# Altium footprint library Header_Pcb.PcbLib: 49 footprints (part 1 of 4)
Each footprint in its own frame and in the unit in brackets; x right, y up, seen from the top. Pads: shape width x height; smd on the part's side, far side on the other; paste and mask are expansions set on the pad; w line width, h text height; cw(c..) or ccw(c..) is an arc to the next point about the centre after c.
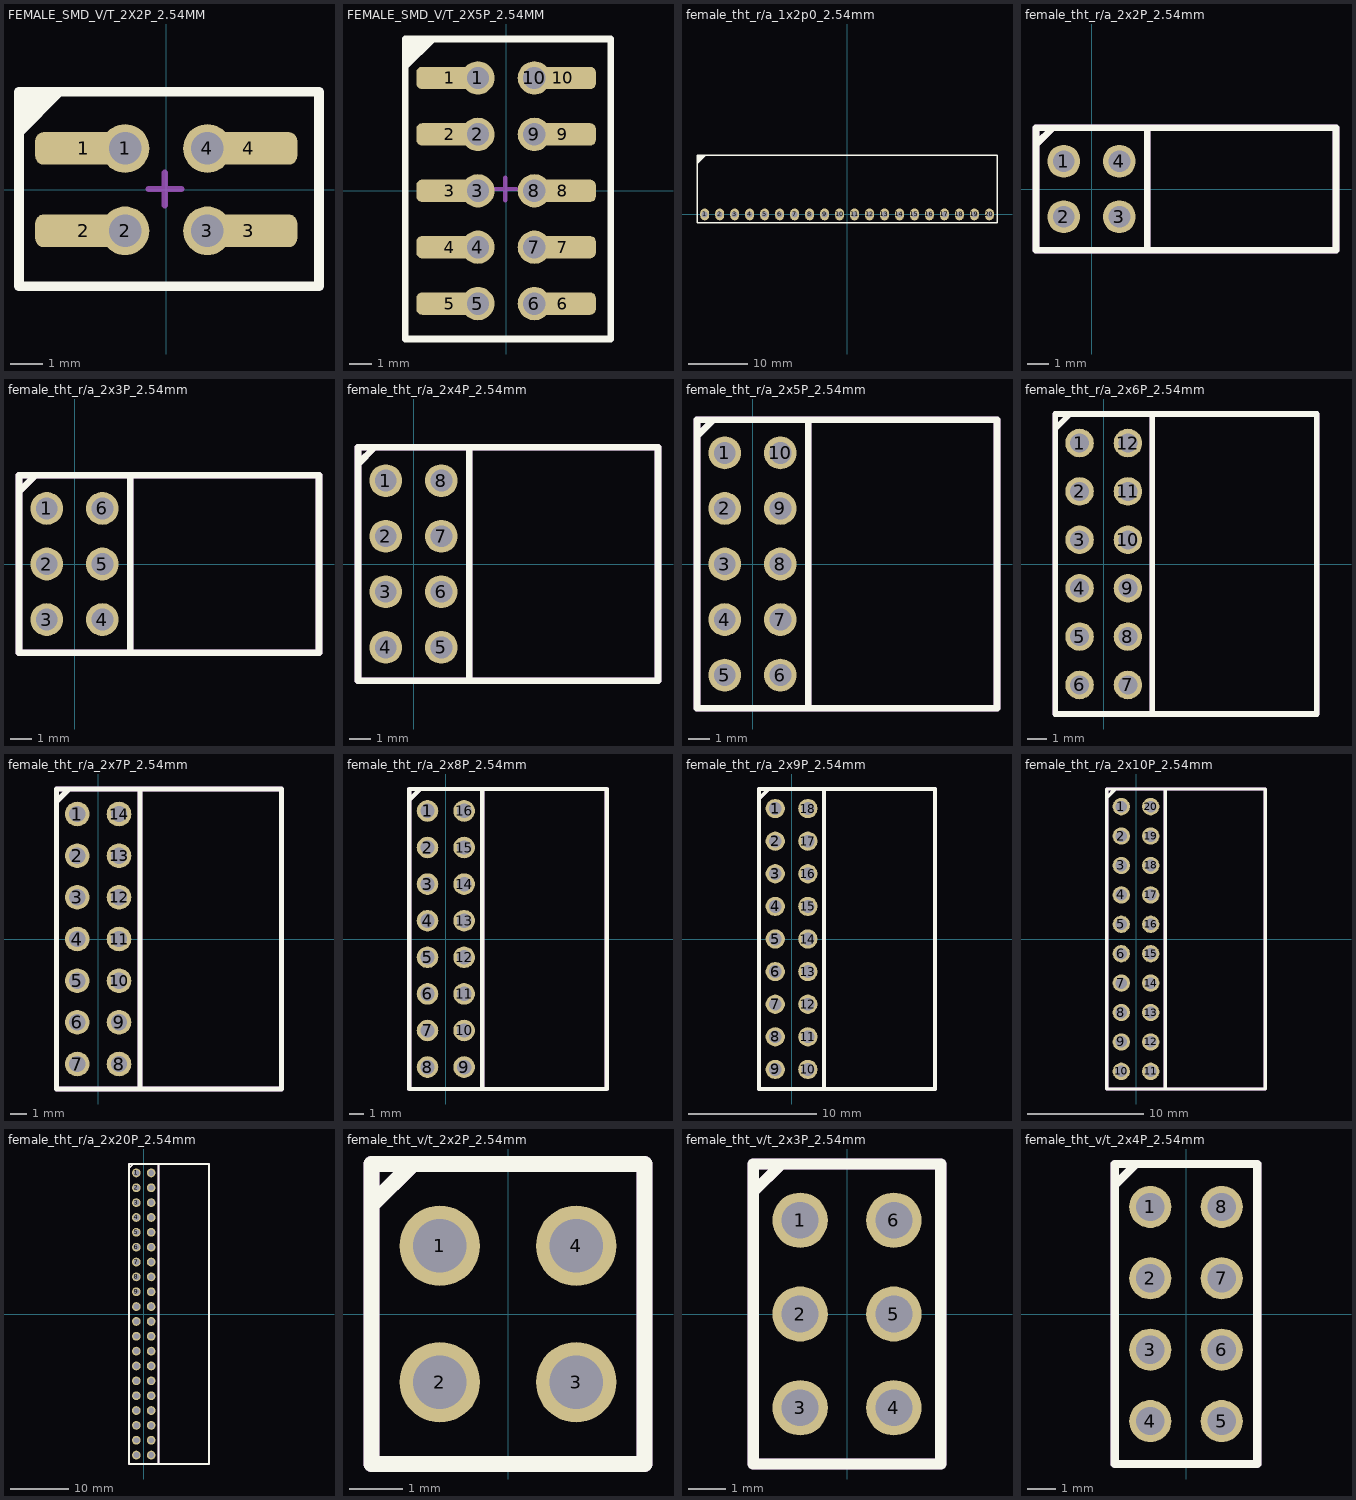
[diagram p0: the footprints below, top view; thin cyan lines are the x and y axes]

## FEMALE_SMD_V/T_2X2P_2.54MM [mm]
pads (8):
  rrect50% 3x1 smd: 1(-2.54,1.27) 2(-2.54,-1.27) 3(2.54,-1.27) 4(2.54,1.27)
  round 1.5 hole 1: 1(-1.27,1.27) 2(-1.27,-1.27) 3(1.27,-1.27) 4(1.27,1.27)
Top Overlay:
  lines w0.3: -4.54,1.77 -3.29,3.02 ; -4.54,2.02 -3.54,3.02 ; -4.54,2.27 -3.79,3.02 ; -4.54,2.52 -4.04,3.02 ; -4.04,2.77 -3.79,3.02 ; -4.04,2.77 -4.04,2.77 ; -3.79,3.02 -3.79,3.02 ; -3.54,3.02 -3.79,2.77 -3.54,3.02 ; -4.54,-2.98 4.71,-2.98 4.71,3.02 -4.54,3.02 -4.54,-2.98
Mechanical 13:
  lines w0.2: -4.54,1.77 -3.29,3.02 ; -4.54,-2.98 4.71,-2.98 4.71,3.02 -4.54,3.02 -4.54,-2.98
Mechanical 15:
  lines w0.2: -0.54,0.02 0.46,0.02 ; -0.04,-0.48 -0.04,0.52 ; -4.54,-2.98 4.71,-2.98 4.71,3.02 -4.54,3.02 -4.54,-2.98
3D body "female_vt_2x2p_smd_2.54mm.stp": height 7.46, standoff 0.01, extent -3.39,-2.77 3.31,2.81

## FEMALE_SMD_V/T_2X5P_2.54MM [mm]
pads (20):
  rrect50% 3x1 smd: 1(-2.54,5.08) 2(-2.54,2.54) 3(-2.54,0) 4(-2.54,-2.54) 5(-2.54,-5.08) 6(2.54,-5.08) 7(2.54,-2.54) 8(2.54,0) 9(2.54,2.54) 10(2.54,5.08)
  round 1.5 hole 1: 1(-1.27,5.08) 2(-1.27,2.54) 3(-1.27,0) 4(-1.27,-2.54) 5(-1.27,-5.08) 6(1.27,-5.08) 7(1.27,-2.54) 8(1.27,0) 9(1.27,2.54) 10(1.27,5.08)
Top Overlay:
  lines w0.3: -4.54,5.58 -3.29,6.83 ; -4.54,5.83 -3.54,6.83 ; -4.54,6.08 -3.79,6.83 ; -4.54,6.33 -4.04,6.83 ; -4.04,6.58 -4.04,6.58 ; -4.04,6.58 -3.79,6.83 ; -3.79,6.83 -3.79,6.83 ; -3.54,6.83 -3.79,6.58 -3.54,6.83 ; -4.54,-6.67 -4.54,6.83 4.71,6.83 4.71,-6.67 -4.54,-6.67
Mechanical 13:
  lines w0.2: -4.54,5.58 -3.29,6.83 ; -4.54,-6.67 -4.54,6.83 4.71,6.83 4.71,-6.67 -4.54,-6.67
  text ".Designator" at -2.54,0.065 h1.25
Mechanical 15:
  lines w0.2: -0.54,0.08 0.46,0.08 ; -0.04,-0.42 -0.04,0.58 ; -4.54,-6.67 -4.54,6.83 4.71,6.83 4.71,-6.67 -4.54,-6.67
3D body "female_vt_2x10p_smd_2.54mm.stp": height 8.91, standoff 0.01, extent -4.165,-6.595 4.335,6.605

## female_tht_r/a_1x2p0_2.54mm [mm]
pads (20):
  oval 1.5x2 hole 1: 1(-24.13,0) 2(-21.59,0) 3(-19.05,0) 4(-16.51,0) 5(-13.97,0) 6(-11.43,0) 7(-8.89,0) 8(-6.35,0) 9(-3.81,0) 10(-1.27,0) 11(1.27,0) 12(3.81,0) 13(6.35,0) 14(8.89,0) 15(11.43,0) 16(13.97,0) 17(16.51,0) 18(19.05,0) 19(21.59,0) 20(24.13,0)
Top Overlay:
  region: -25.355,9.925 -23.905,9.925 -25.355,8.475
  lines w0.25: -25.43,-1.375 -25.43,10 25.42,10 25.42,-1.375 -25.43,-1.375
3D body "single female 20P 2.54pitch right angle.stp": height 2.55, standoff -3.19, extent -25.43,-0.3 25.37,8.3

## female_tht_r/a_2x2P_2.54mm [mm]
pads (4):
  round 1.5 hole 1: 1(-1.27,1.27) 2(-1.27,-1.27) 3(1.27,-1.27) 4(1.27,1.27)
Top Overlay:
  lines w0.3: -2.54,2.032 -1.778,2.794 ; 2.54,-2.794 2.54,2.794 ; -2.54,-2.794 -2.54,2.794 11.176,2.794 11.176,-2.794 -2.54,-2.794
Mechanical 13:
  lines w0.3: -2.54,2.032 -1.778,2.794 ; 2.54,-2.794 2.54,2.794 ; -2.54,-2.794 -2.54,2.794 11.176,2.794 11.176,-2.794 -2.54,-2.794
  text ".designator" at 2.687,-0.824 h1.5
3D body "female ra 2X2P 2.45mm.stp": height 5.01, standoff -3.19, extent -1.56,-2.665 11.04,2.665

## female_tht_r/a_2x3P_2.54mm [mm]
pads (6):
  round 1.5 hole 1: 1(-1.27,2.54) 2(-1.27,0) 3(-1.27,-2.54) 4(1.27,-2.54) 5(1.27,0) 6(1.27,2.54)
Top Overlay:
  lines w0.3: -2.54,3.302 -1.778,4.064 ; 2.54,-4.064 2.54,2.54 2.54,4.064 ; 2.54,-4.064 -2.54,-4.064 -2.54,2.54 -2.54,4.064 2.54,4.064 ; 2.54,-4.064 11.176,-4.064 11.176,4.064 2.54,4.064
Mechanical 13:
  lines w0.3: -2.54,3.302 -1.778,4.064 ; 2.54,-4.064 2.54,2.54 2.54,4.064 ; 2.54,-4.064 -2.54,-4.064 -2.54,2.54 -2.54,4.064 2.54,4.064 ; 2.54,-4.064 11.176,-4.064 11.176,4.064 2.54,4.064
  text ".designator" at 2.941,-0.824 h1.5
3D body "female ra 2X3P 2.45mm.stp": height 5.01, standoff -3.19, extent -1.56,-3.935 11.04,3.935

## female_tht_r/a_2x4P_2.54mm [mm]
pads (8):
  round 1.5 hole 1: 1(-1.27,3.81) 2(-1.27,1.27) 3(-1.27,-1.27) 4(-1.27,-3.81) 5(1.27,-3.81) 6(1.27,-1.27) 7(1.27,1.27) 8(1.27,3.81)
Top Overlay:
  lines w0.3: -2.54,4.572 -1.778,5.334 ; 2.54,-5.334 2.54,3.81 2.54,5.334 ; 2.54,-5.334 -2.54,-5.334 -2.54,3.81 -2.54,5.334 2.54,5.334 ; 2.54,-5.334 11.176,-5.334 11.176,5.334 2.54,5.334
Mechanical 13:
  lines w0.3: -2.54,4.572 -1.778,5.334 ; 2.54,-5.334 2.54,3.81 2.54,5.334 ; 2.54,-5.334 -2.54,-5.334 -2.54,3.81 -2.54,5.334 2.54,5.334 ; 2.54,-5.334 11.176,-5.334 11.176,5.334 2.54,5.334
  text ".designator" at 2.941,-0.824 h1.5
3D body "female ra 2X4P 2.45mm.stp": height 5.01, standoff -3.19, extent -1.56,-5.205 11.04,5.205

## female_tht_r/a_2x5P_2.54mm [mm]
pads (10):
  round 1.5 hole 1: 1(-1.27,5.08) 2(-1.27,2.54) 3(-1.27,0) 4(-1.27,-2.54) 5(-1.27,-5.08) 6(1.27,-5.08) 7(1.27,-2.54) 8(1.27,0) 9(1.27,2.54) 10(1.27,5.08)
Top Overlay:
  lines w0.3: -2.54,5.842 -1.778,6.604 ; 2.54,-6.604 2.54,5.08 2.54,6.604 ; 2.54,-6.604 -2.54,-6.604 -2.54,5.08 -2.54,6.604 2.54,6.604 ; 2.54,-6.604 11.176,-6.604 11.176,6.604 2.54,6.604
Mechanical 13:
  lines w0.3: -2.54,5.842 -1.778,6.604 ; 2.54,-6.604 2.54,5.08 2.54,6.604 ; 2.54,-6.604 -2.54,-6.604 -2.54,5.08 -2.54,6.604 2.54,6.604 ; 2.54,-6.604 11.176,-6.604 11.176,6.604 2.54,6.604
  text ".designator" at 2.941,-0.824 h1.5
3D body "female ra 2X5P 2.45mm.stp": height 5.01, standoff -3.19, extent -1.56,-6.475 11.04,6.475

## female_tht_r/a_2x6P_2.54mm [mm]
pads (12):
  round 1.5 hole 1: 1(-1.27,6.35) 2(-1.27,3.81) 3(-1.27,1.27) 4(-1.27,-1.27) 5(-1.27,-3.81) 6(-1.27,-6.35) 7(1.27,-6.35) 8(1.27,-3.81) 9(1.27,-1.27) 10(1.27,1.27) 11(1.27,3.81) 12(1.27,6.35)
Top Overlay:
  lines w0.3: -2.54,7.112 -1.778,7.874 ; 2.54,-7.874 11.176,-7.874 11.176,7.874 2.54,7.874 ; 2.54,-7.874 2.54,6.35 2.54,7.874 ; 2.54,-7.874 -2.54,-7.874 -2.54,6.35 -2.54,7.874 2.54,7.874
Mechanical 13:
  lines w0.3: -2.54,7.112 -1.778,7.874 ; 2.54,-7.874 11.176,-7.874 11.176,7.874 2.54,7.874 ; 2.54,-7.874 2.54,6.35 2.54,7.874 ; 2.54,-7.874 -2.54,-7.874 -2.54,6.35 -2.54,7.874 2.54,7.874
  text ".designator" at 2.941,-0.824 h1.5
3D body "female ra 2X6P 2.45mm.stp": height 5.01, standoff -3.19, extent -1.56,-7.745 11.04,7.745

## female_tht_r/a_2x7P_2.54mm [mm]
pads (14):
  round 1.5 hole 1: 1(-1.27,7.62) 2(-1.27,5.08) 3(-1.27,2.54) 4(-1.27,0) 5(-1.27,-2.54) 6(-1.27,-5.08) 7(-1.27,-7.62) 8(1.27,-7.62) 9(1.27,-5.08) 10(1.27,-2.54) 11(1.27,0) 12(1.27,2.54) 13(1.27,5.08) 14(1.27,7.62)
Top Overlay:
  lines w0.3: -2.54,8.382 -1.778,9.144 ; 2.54,-9.144 -2.54,-9.144 -2.54,7.62 -2.54,9.144 2.54,9.144 ; 2.54,-9.144 2.54,7.62 2.54,9.144 ; 2.54,-9.144 11.176,-9.144 11.176,9.144 2.54,9.144
Mechanical 13:
  lines w0.3: -2.54,8.382 -1.778,9.144 ; 2.54,-9.144 -2.54,-9.144 -2.54,7.62 -2.54,9.144 2.54,9.144 ; 2.54,-9.144 2.54,7.62 2.54,9.144 ; 2.54,-9.144 11.176,-9.144 11.176,9.144 2.54,9.144
  text ".designator" at 2.941,-0.824 h1.5
3D body "female ra 2X7P 2.45mm.stp": height 5.01, standoff -3.19, extent -1.56,-9.015 11.04,9.015

## female_tht_r/a_2x8P_2.54mm [mm]
pads (16):
  round 1.5 hole 1: 1(-1.27,8.89) 2(-1.27,6.35) 3(-1.27,3.81) 4(-1.27,1.27) 5(-1.27,-1.27) 6(-1.27,-3.81) 7(-1.27,-6.35) 8(-1.27,-8.89) 9(1.27,-8.89) 10(1.27,-6.35) 11(1.27,-3.81) 12(1.27,-1.27) 13(1.27,1.27) 14(1.27,3.81) 15(1.27,6.35) 16(1.27,8.89)
Top Overlay:
  lines w0.3: -2.54,9.652 -1.778,10.414 ; 2.54,-10.414 11.176,-10.414 11.176,10.414 2.54,10.414 ; 2.54,-10.414 2.54,8.89 2.54,10.414 ; 2.54,-10.414 -2.54,-10.414 -2.54,8.89 -2.54,10.414 2.54,10.414
Mechanical 13:
  lines w0.3: -2.54,9.652 -1.778,10.414 ; 2.54,-10.414 11.176,-10.414 11.176,10.414 2.54,10.414 ; 2.54,-10.414 2.54,8.89 2.54,10.414 ; 2.54,-10.414 -2.54,-10.414 -2.54,8.89 -2.54,10.414 2.54,10.414
  text ".designator" at 2.941,-0.824 h1.5
3D body "female ra 2X8P 2.45mm.stp": height 5.01, standoff -3.19, extent -1.56,-10.285 11.04,10.285

## female_tht_r/a_2x9P_2.54mm [mm]
pads (18):
  round 1.5 hole 1: 1(-1.27,10.16) 2(-1.27,7.62) 3(-1.27,5.08) 4(-1.27,2.54) 5(-1.27,0) 6(-1.27,-2.54) 7(-1.27,-5.08) 8(-1.27,-7.62) 9(-1.27,-10.16) 10(1.27,-10.16) 11(1.27,-7.62) 12(1.27,-5.08) 13(1.27,-2.54) 14(1.27,0) 15(1.27,2.54) 16(1.27,5.08) 17(1.27,7.62) 18(1.27,10.16)
Top Overlay:
  lines w0.3: -2.54,10.922 -1.778,11.684 ; 2.54,-11.684 11.176,-11.684 11.176,11.684 2.54,11.684 ; 2.54,-11.684 -2.54,-11.684 -2.54,10.16 -2.54,11.684 2.54,11.684 ; 2.54,-11.684 2.54,10.16 2.54,11.684
Mechanical 13:
  lines w0.3: -2.54,10.922 -1.778,11.684 ; 2.54,-11.684 11.176,-11.684 11.176,11.684 2.54,11.684 ; 2.54,-11.684 2.54,10.16 2.54,11.684 ; 2.54,-11.684 -2.54,-11.684 -2.54,10.16 -2.54,11.684 2.54,11.684
  text ".designator" at 2.941,-0.824 h1.5
3D body "female ra 2X9P 2.45mm.stp": height 5.01, standoff -3.19, extent -1.56,-11.555 11.04,11.555

## female_tht_r/a_2x10P_2.54mm [mm]
pads (20):
  round 1.5 hole 1: 1(-1.27,11.43) 2(-1.27,8.89) 3(-1.27,6.35) 4(-1.27,3.81) 5(-1.27,1.27) 6(-1.27,-1.27) 7(-1.27,-3.81) 8(-1.27,-6.35) 9(-1.27,-8.89) 10(-1.27,-11.43) 11(1.27,-11.43) 12(1.27,-8.89) 13(1.27,-6.35) 14(1.27,-3.81) 15(1.27,-1.27) 16(1.27,1.27) 17(1.27,3.81) 18(1.27,6.35) 19(1.27,8.89) 20(1.27,11.43)
Top Overlay:
  lines w0.3: -2.54,12.192 -1.778,12.954 ; 2.54,-12.954 11.176,-12.954 11.176,12.954 2.54,12.954 ; 2.54,-12.954 2.54,11.43 2.54,12.954 ; 2.54,-12.954 -2.54,-12.954 -2.54,11.43 -2.54,12.954 2.54,12.954
Mechanical 13:
  lines w0.3: -2.54,12.192 -1.778,12.954 ; 2.54,-12.954 11.176,-12.954 11.176,12.954 2.54,12.954 ; 2.54,-12.954 -2.54,-12.954 -2.54,11.43 -2.54,12.954 2.54,12.954 ; 2.54,-12.954 2.54,11.43 2.54,12.954
  text ".designator" at 2.941,-0.824 h1.5
3D body "female ra 2X10P 2.45mm.stp": height 5.01, standoff -3.19, extent -1.56,-12.825 11.04,12.825

## female_tht_r/a_2x20P_2.54mm [mm]
pads (40):
  round 1.5 hole 1: 1(-1.27,24.13) 2(-1.27,21.59) 3(-1.27,19.05) 4(-1.27,16.51) 5(-1.27,13.97) 6(-1.27,11.43) 7(-1.27,8.89) 8(-1.27,6.35) 9(-1.27,3.81) 10(-1.27,1.27) 11(-1.27,-1.27) 12(-1.27,-3.81) 13(-1.27,-6.35) 14(-1.27,-8.89) 15(-1.27,-11.43) 16(-1.27,-13.97) 17(-1.27,-16.51) 18(-1.27,-19.05) 19(-1.27,-21.59) 20(-1.27,-24.13) 21(1.27,-24.13) 22(1.27,-21.59) 23(1.27,-19.05) 24(1.27,-16.51) 25(1.27,-13.97) 26(1.27,-11.43) 27(1.27,-8.89) 28(1.27,-6.35) 29(1.27,-3.81) 30(1.27,-1.27) 31(1.27,1.27) 32(1.27,3.81) 33(1.27,6.35) 34(1.27,8.89) 35(1.27,11.43) 36(1.27,13.97) 37(1.27,16.51) 38(1.27,19.05) 39(1.27,21.59) 40(1.27,24.13)
Top Overlay:
  lines w0.3: -2.54,24.892 -1.778,25.654 ; 2.54,-25.654 11.176,-25.654 11.176,25.654 2.54,25.654 ; 2.54,-25.654 2.54,24.13 2.54,25.654 ; 2.54,-25.654 -2.54,-25.654 -2.54,24.13 -2.54,25.654 2.54,25.654
Mechanical 13:
  lines w0.3: -2.54,24.892 -1.778,25.654 ; 2.54,-25.654 11.176,-25.654 11.176,25.654 2.54,25.654 ; 2.54,-25.654 -2.54,-25.654 -2.54,24.13 -2.54,25.654 2.54,25.654 ; 2.54,-25.654 2.54,24.13 2.54,25.654
  text ".designator" at 2.941,-0.824 h1.5
3D body "female ra 2X20P 2.45mm.stp": height 5.01, standoff -3.19, extent -1.524,-25.525 11.076,25.525

## female_tht_v/t_2x2P_2.54mm [mm]
pads (4):
  round 1.5 hole 1: 1(-1.27,1.27) 2(-1.27,-1.27) 3(1.27,-1.27) 4(1.27,1.27)
Top Overlay:
  lines w0.3: -2.54,2.032 -1.778,2.794 ; -2.54,-2.794 -2.54,1.27 -2.54,2.794 2.54,2.794 2.54,1.27 2.54,-2.794 -2.54,-2.794
Mechanical 13:
  lines w0.3: -2.54,2.032 -1.778,2.794 ; -2.54,-2.794 -2.54,1.27 -2.54,2.794 2.54,2.794 2.54,1.27 2.54,-2.794 -2.54,-2.794
  text ".designator" at -2.242,-0.864 h1.5

## female_tht_v/t_2x3P_2.54mm [mm]
pads (6):
  round 1.5 hole 1: 1(-1.27,2.54) 2(-1.27,0) 3(-1.27,-2.54) 4(1.27,-2.54) 5(1.27,0) 6(1.27,2.54)
Top Overlay:
  lines w0.3: -2.54,3.302 -1.778,4.064 ; -2.54,-4.064 2.54,-4.064 2.54,2.54 2.54,4.064 -2.54,4.064 -2.54,2.54 -2.54,-4.064
Mechanical 13:
  lines w0.3: -2.54,3.302 -1.778,4.064 ; -2.54,-4.064 2.54,-4.064 2.54,2.54 2.54,4.064 -2.54,4.064 -2.54,2.54 -2.54,-4.064
  text ".designator" at 1.078,-3.917 h1.5
3D body "female_header_2x3P_2.54mm.step": height 8.51, standoff -2.99, extent -2.5,-4.06 2.5,4.06

## female_tht_v/t_2x4P_2.54mm [mm]
pads (8):
  round 1.5 hole 1: 1(-1.27,3.81) 2(-1.27,1.27) 3(-1.27,-1.27) 4(-1.27,-3.81) 5(1.27,-3.81) 6(1.27,-1.27) 7(1.27,1.27) 8(1.27,3.81)
Top Overlay:
  lines w0.3: -2.54,4.572 -1.778,5.334 ; -2.54,-5.334 -2.54,3.81 -2.54,5.334 2.54,5.334 2.54,3.81 2.54,-5.334 -2.54,-5.334
Mechanical 13:
  lines w0.3: -2.54,4.572 -1.778,5.334 ; -2.54,-5.334 -2.54,3.81 -2.54,5.334 2.54,5.334 2.54,3.81 2.54,-5.334 -2.54,-5.334
  text ".designator" at 1.078,-4.171 h1.5
3D body "female_header_2x4P_2.54mm.step": height 8.51, standoff -2.99, extent -2.5,-5.33 2.5,5.33